# Altium schematic symbol library LR0204F2K2.SchLib: 1 symbol
Pins are listed as number, name and electrical type; pins without a type are passive.

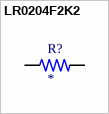
[diagram p0: symbol LR0204F2K2]

## LR0204F2K2
designator R?
2.2 kOhms Â±1% 0.25W, 1/4W Through Hole Resistor Axial - Metal Film; MF: TE Connectivity Passive Product; MP: LR0204F2K2; SnapEDA_Link: https://www.snapeda.com/parts/LR0204F2K2/TE/view-part/?ref=snap; Package: Axial TE Connectivity Passive Product; Value: *; Check_prices: https://www.snapeda.com/parts/LR0204F2K2/TE/view-part/?ref=eda
footprint RESAD640W45L370D200
pins: 1, 2